# Altium integrated library LMR33630ADDA.IntLib: 1 symbol
Pins are listed as number, name and electrical type; pins without a type are passive.

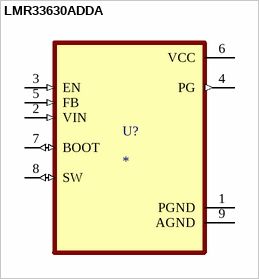
[diagram p0: symbol LMR33630ADDA]

## LMR33630ADDA
designator U?
SIMPLE SWITCHERÂ® 3.8V to 36V, 3A Synchronous Buck Converter With Ultra-Low EMI; MF: Texas Instruments; MP: LMR33630ADDA; SnapEDA_Link: https://www.snapeda.com/parts/LMR33630ADDA/Texas+Instruments/view-part/?ref=snap; Package: HSOIC-8 Texas Instruments; Value: *; Check_prices: https://www.snapeda.com/parts/LMR33630ADDA/Texas+Instruments/view-part/?ref=eda
footprint VREG_LM5017MR/NOPB
pins: 1 PGND (power), 2 VIN (in), 3 EN (in), 4 PG (out), 5 FB (in), 6 VCC (power), 7 BOOT (io), 8 SW (io), 9 AGND (power)